# Altium schematic symbol library FPC.SCHLIB: 3 symbols
Pins are listed as number, name and electrical type; pins without a type are passive.

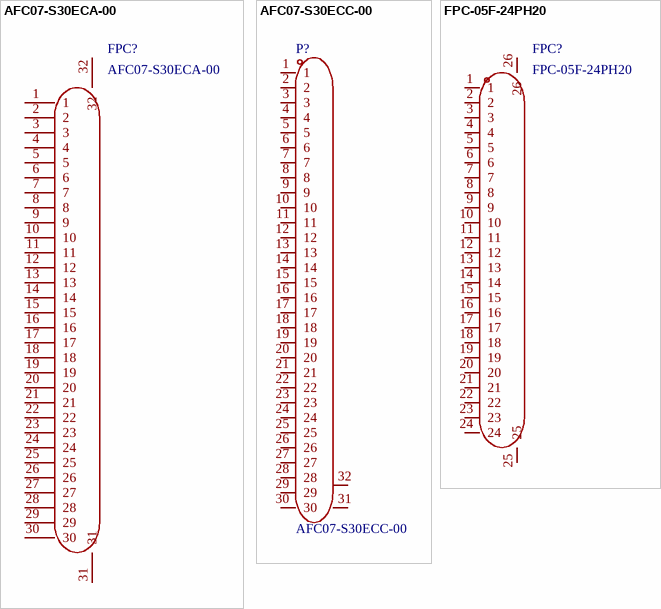
[diagram p0: symbols AFC07-S30ECA-00 to FPC-05F-24PH20]

## AFC07-S30ECA-00
designator FPC?
Manufacturer: JS(钜硕电子); Add into BOM: yes; Locking Feature: 抽屉式; Number of Contacts: 30P; Pitch: 0.5mm; FFC, FCB Thickness: 0.3mm; Symbol: AFC07-S30ECA-00; Device: AFC07-S30ECA-00; LCSC Part Name: 间距:0.5mm P数:30P 抽屉式 上接; Supplier Part: C262645; Manufacturer Part: AFC07-S30ECA-00; Supplier Footprint: SMD,P=0.5mm,卧贴; JLCPCB Part Class: 扩展库; Datasheet: https://atta.szlcsc.com/upload/public/pdf/source/20190726/C11082_A2E7B12387019CE4314BB5199EE0FDF4.pdf; Supplier: LCSC; Convert to PCB: yes; Contact Type: 上接; Mounting Type: 卧贴; Height Above Board: 2mm
footprint FPC-SMD_P0.50-30P_LCS-SJ-H2.0
3D model FPC-SMD_P0.50-30P_LCS-SJ-H2.0
pins: 1, 2, 3, 4, 5, 6, 7, 8, 9, 10, 11, 12, 13, 14, 15, 16, 17, 18, 19, 20, 21, 22, 23, 24, 25, 26, 27, 28, 29, 30, 31, 32

## AFC07-S30ECC-00
designator P?
Manufacturer: JS(钜硕电子); Symbol: FPC 0.5MM 30P Pull type H2.0mm Pick up; Add into BOM: yes; Locking Feature: 抽屉式; Number of Contacts: 30P; Pitch: 0.5mm; FFC, FCB Thickness: 0.3mm; Rated Voltage (Max): 50V; Current Rating (Max): 400mA; Device: AFC07-S30ECC-00; LCSC Part Name: 抽屉式 上接 P数:30P 间距:0.5mm; Supplier Part: C11095; Manufacturer Part: AFC07-S30ECC-00; Supplier Footprint: SMD,P=0.5mm,卧贴; JLCPCB Part Class: 扩展库; Datasheet: https://item.szlcsc.com/datasheet/AFC07-S30ECC-00/11642.html; Supplier: LCSC; Convert to PCB: yes; Contact Type: 上接; Mounting Type: 卧贴; Height Above Board: 2mm; Contact Material: 磷青铜; Contact Plating: 锡; Operating Temperature: -25℃~+85℃
footprint FPC-SMD_AFC07-S30ECC-00
3D model FPC-SMD_L20.6-W5.4-H2.0-AFC07-S30ECC-00
pins: 1, 2, 3, 4, 5, 6, 7, 8, 9, 10, 11, 12, 13, 14, 15, 16, 17, 18, 19, 20, 21, 22, 23, 24, 25, 26, 27, 28, 29, 30, 31, 32

## FPC-05F-24PH20
designator FPC?
Manufacturer: XUNPU(讯普); Add into BOM: yes; Locking Feature: 翻盖式; Number of Contacts: 24P; Pitch: 0.5mm; FFC, FCB Thickness: 0.3mm; Rated Voltage (Max): 50V; Current Rating (Max): 500mA; Symbol: FPC-05F-24PH20; Device: FPC-05F-24PH20; LCSC Part Name: 翻盖式 卧贴 P数:24P 间距:0.5mm; Supplier Part: C2856805; Manufacturer Part: FPC-05F-24PH20; Supplier Footprint: SMD,P=0.5mm,卧贴; JLCPCB Part Class: 扩展库; Datasheet: https://item.szlcsc.com/datasheet/FPC-05F-24PH20/3056903.html; Supplier: LCSC; Convert to PCB: yes; Contact Type: 卧贴; Mounting Type: 下接; Height Above Board: 2mm; Contact Material: 磷青铜; Contact Plating: 锡; Operating Temperature: -25℃~+85℃
footprint FPC-SMD_24P-P0.50_FPC-05F-24PH20
3D model FPC-SMD_24P-P0.50_FPC-05F-24PH20
pins: 1, 2, 3, 4, 5, 6, 7, 8, 9, 10, 11, 12, 13, 14, 15, 16, 17, 18, 19, 20, 21, 22, 23, 24, 25, 26